# Altium footprint library SMBJ15A.PcbLib: 3 footprints
Each footprint in its own frame and in the unit in brackets; x right, y up, seen from the top. Pads: shape width x height; smd on the part's side, far side on the other; paste and mask are expansions set on the pad; w line width, h text height; cw(c..) or ccw(c..) is an arc to the next point about the centre after c.
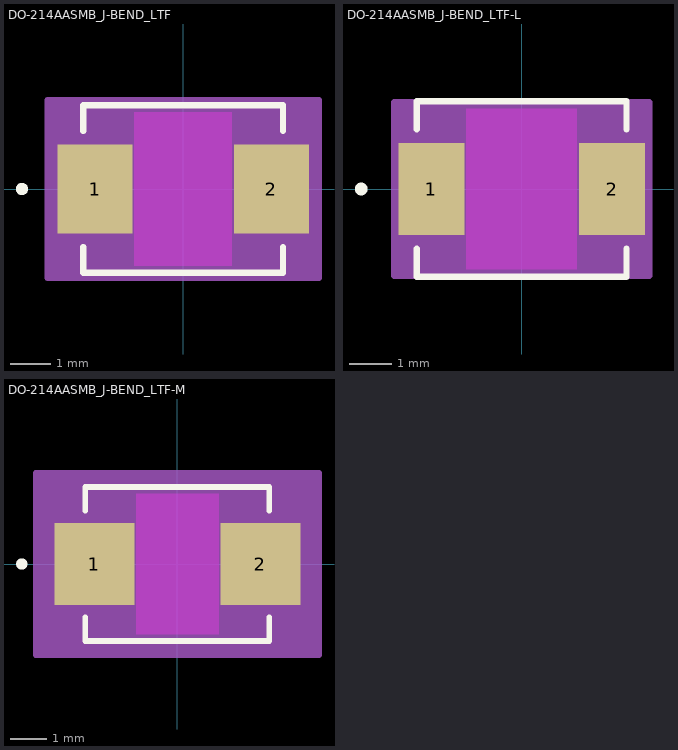
[diagram p0: the footprints below, top view; thin cyan lines are the x and y axes]

## DO-214AASMB_J-BEND_LTF [mm]
pads (2):
  rect 1.874x2.234 smd paste+0 mask+0: 1(-2.207,0) 2(2.207,0)
Top Layer keep-out:
  region: -1.219,-1.918 -1.219,1.918 1.219,1.918 1.219,-1.918
Top Overlay:
  circle w0.152: c-4.033,0 r0.076
  lines w0.152: -2.502,-1.45 -2.502,-2.095 2.502,-2.095 2.502,-1.45 ; -2.502,1.45 -2.502,2.095 2.502,2.095 2.502,1.45
  text ".Designator" at -3.492,-0.635 h1.27
Keep-Out Layer:
  region: -1.219,-1.918 -1.219,1.918 1.219,1.918 1.219,-1.918
Mechanical 13:
  circle w0.025: c-2.207,0 r0.076
  lines w0.025: -2.375,-0.984 -1.391,-1.968 ; -2.375,0.984 -1.391,1.968 ; -2.794,-1.092 -2.375,-1.092 -2.375,1.092 -2.794,1.092 -2.794,-1.092 ; -2.375,-1.968 -2.375,1.968 2.375,1.968 2.375,-1.968 -2.375,-1.968 ; 2.375,-1.092 2.794,-1.092 2.794,1.092 2.375,1.092 2.375,-1.092
  text ".Designator" at -3.492,-0.635 h1.27
Mechanical 15:
  region: 3.398,-2.222 -3.398,-2.222 -3.398,2.222 3.398,2.222
  lines w0.152: -3.398,-2.222 3.398,-2.222 3.398,2.222 -3.398,2.222 -3.398,-2.222

## DO-214AASMB_J-BEND_LTF-L [mm]
pads (2):
  rect 1.574x2.194 smd paste+0 mask+0: 1(-2.157,0) 2(2.157,0)
Top Layer keep-out:
  region: -1.319,-1.918 -1.319,1.918 1.319,1.918 1.319,-1.918
Top Overlay:
  circle w0.152: c-3.833,0 r0.076
  lines w0.152: -2.502,-1.43 -2.502,-2.095 2.502,-2.095 2.502,-1.43 ; -2.502,1.43 -2.502,2.095 2.502,2.095 2.502,1.43
  text ".Designator" at -3.492,-0.635 h1.27
Keep-Out Layer:
  region: -1.319,-1.918 -1.319,1.918 1.319,1.918 1.319,-1.918
Mechanical 13:
  circle w0.025: c-2.157,0 r0.076
  lines w0.025: -2.375,-0.984 -1.391,-1.968 ; -2.375,0.984 -1.391,1.968 ; -2.794,-1.092 -2.794,1.092 -2.375,1.092 -2.375,-1.092 -2.794,-1.092 ; -2.375,-1.968 2.375,-1.968 2.375,1.968 -2.375,1.968 -2.375,-1.968 ; 2.375,-1.092 2.375,1.092 2.794,1.092 2.794,-1.092 2.375,-1.092
  text ".Designator" at -3.492,-0.635 h1.27
Mechanical 15:
  region: 3.046,-2.07 -3.046,-2.07 -3.046,2.07 3.046,2.07
  lines w0.152: -3.046,-2.07 -3.046,2.07 3.046,2.07 3.046,-2.07 -3.046,-2.07

## DO-214AASMB_J-BEND_LTF-M [mm]
pads (2):
  rect 2.174x2.234 smd paste+0 mask+0: 1(-2.257,0) 2(2.257,0)
Top Layer keep-out:
  region: -1.119,-1.918 -1.119,1.918 1.119,1.918 1.119,-1.918
Top Overlay:
  circle w0.152: c-4.233,0 r0.076
  lines w0.152: -2.502,-1.45 -2.502,-2.095 2.502,-2.095 2.502,-1.45 ; -2.502,1.45 -2.502,2.095 2.502,2.095 2.502,1.45
  text ".Designator" at -3.492,-0.635 h1.27
Keep-Out Layer:
  region: -1.119,-1.918 -1.119,1.918 1.119,1.918 1.119,-1.918
Mechanical 13:
  circle w0.025: c-2.257,0 r0.076
  lines w0.025: -2.375,-0.984 -1.391,-1.968 ; -2.375,0.984 -1.391,1.968 ; -2.794,-1.092 -2.794,1.092 -2.375,1.092 -2.375,-1.092 -2.794,-1.092 ; -2.375,-1.968 2.375,-1.968 2.375,1.968 -2.375,1.968 -2.375,-1.968 ; 2.375,-1.092 2.375,1.092 2.794,1.092 2.794,-1.092 2.375,-1.092
  text ".Designator" at -3.492,-0.635 h1.27
Mechanical 15:
  region: 3.852,-2.476 -3.852,-2.476 -3.852,2.476 3.852,2.476
  lines w0.152: -3.852,-2.476 -3.852,2.476 3.852,2.476 3.852,-2.476 -3.852,-2.476